# Altium footprint library Capacitor.PcbLib: 73 footprints (part 1 of 5)
Each footprint in its own frame and in the unit in brackets; x right, y up, seen from the top. Pads: shape width x height; smd on the part's side, far side on the other; paste and mask are expansions set on the pad; w line width, h text height; cw(c..) or ccw(c..) is an arc to the next point about the centre after c.
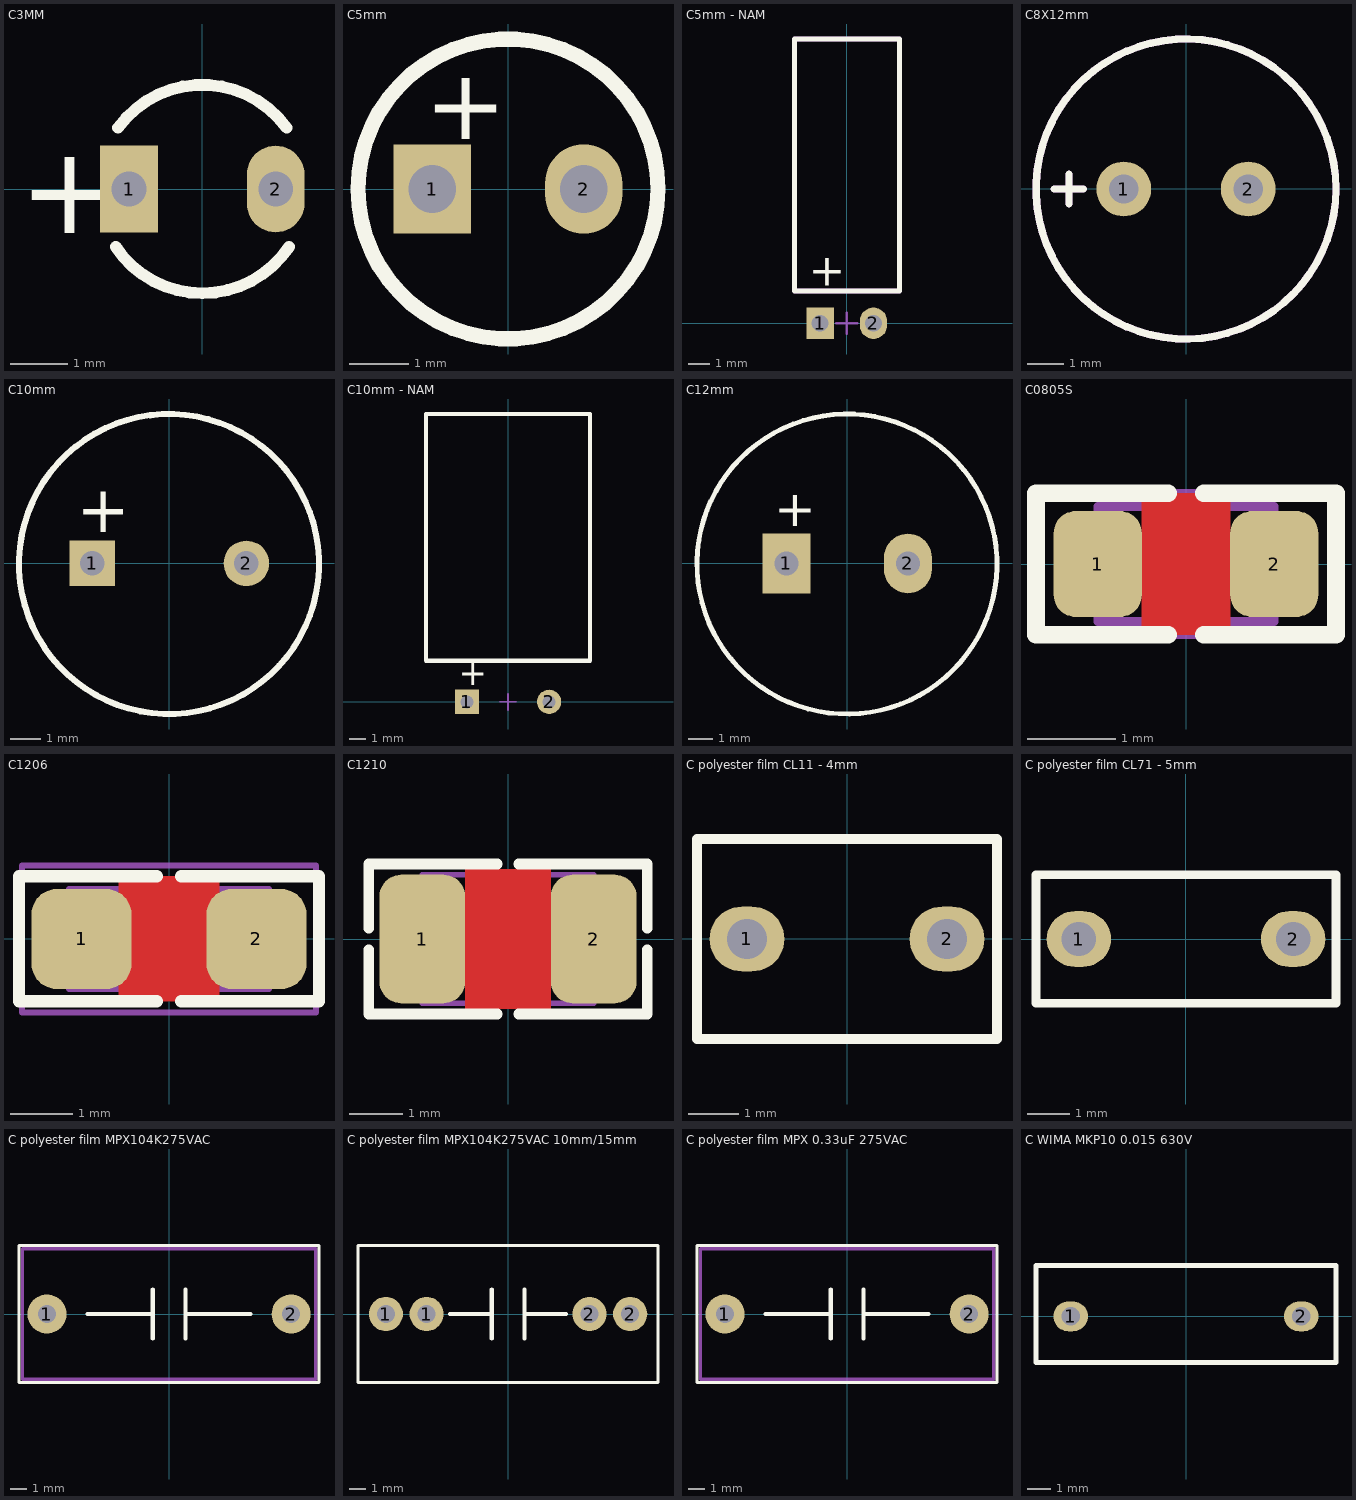
[diagram p0: the footprints below, top view; thin cyan lines are the x and y axes]

## C3MM [mm]
pads (2):
  rect 1x1.5 hole 0.6: 1(-1.27,0)
  oval 1x1.5 hole 0.6: 2(1.27,0)
Top Overlay:
  lines w0.203: -1.502,-1.001 ccw(c0,0) 1.502,-1.001 ; -1.46,1.062 cw(c0,0) 1.46,1.062
  text "+" at -3.175,-0.762 h1.52
Top Designator:
  text ".Designator" at -4.42,-0.369 h1.52
3D body "User Library-Capacitor Radial Electrolitic-150-400x700.step": height 7.01, standoff -2.7, extent -1.989,-2.025 2.01,1.975

## C5mm [mm]
pads (2):
  rect 1.3x1.5 hole 0.8: 1(-1.27,0)
  oval 1.3x1.5 hole 0.8: 2(1.27,0)
Top Overlay:
  circle w0.254: c0,0 r2.515
  text "+" at -1.397,0.838 h1.2
Top Designator:
  text ".Designator" at -3.71,-0.344 h1.52
3D body "User Library-Capacitor Radial Electrolitic 200 - 500x1100.step": height 11.01, standoff -2.7, extent -2.5,-2.5 2.51,2.5

## C5mm - NAM [mm]
pads (2):
  rect 1.3x1.5 hole 0.8: 1(-1.27,0)
  oval 1.3x1.5 hole 0.8: 2(1.27,0)
Top Overlay:
  lines w0.254: -2.489,1.537 2.511,1.537 2.511,13.537 -2.489,13.537 -2.489,1.537
  text "+" at -1.803,1.791 h1.52
Top Designator:
  text ".Designator" at -3.687,6.062 h1.52
Mechanical 12:
  lines w0.1: -0.5,0 0.5,0 ; 0,-0.5 0,0.5
Mechanical 15:
  lines w0.254: -2.489,1.537 2.511,1.537 2.511,13.537 -2.489,13.537 -2.489,1.537
  text "+" at -1.803,1.791 h1.52

## C8X12mm [mm] "Cap Elec, D8.0X12.0H pitch: 3.5mm, RB.14/.26, RB.15/.32"
height 12
pads (2):
  round 1.5 hole 0.8: 1(-1.7,0) 2(1.7,0)
Top Overlay:
  circle w0.2: c0,0 r4.1
  lines w0.2: -3.6,0 -2.8,0 ; -3.2,-0.4 -3.2,0.4
Top Designator:
  text ".Designator" at -3.71,-0.344 h1.52
Mechanical 15:
  circle w0.2: c0,0 r4.1
  lines w0.2: -3.6,0 -2.8,0 ; -3.2,-0.4 -3.2,0.4
3D body "User Library-Cap-EL(8x12-3_5)T.SLDPRT": height 12.3, standoff -3.3, extent -3.989,-3.989 4.001,3.989

## C10mm [mm]
pads (2):
  rect 1.5x1.5 hole 0.8: 1(-2.54,0)
  round 1.5 hole 0.8: 2(2.54,0)
Top Overlay:
  lines w0.203: 3.591,3.365 ccw(c-0.008,-0.022) 3.623,3.33
  text "+" at -3.048,1.016 h1.52
Top Designator:
  text ".Designator" at -3.718,-0.366 h1.52
3D body "User Library-Capacitor Radial Electrolitic 500-1000x2000.step": height 20.01, standoff -2.7, extent -4.988,-5 5.01,5

## C10mm - NAM [mm]
pads (2):
  rect 1.5x1.5 hole 0.8: 1(-2.54,0)
  round 1.5 hole 0.8: 2(2.54,0)
Top Overlay:
  lines w0.254: -5.067,2.54 -5.067,17.793 5.067,17.793 5.067,2.54 -5.067,2.54
  text "+" at -3.048,1.016 h1.52
Top Designator:
  text ".Designator" at -3.71,8.19 h1.52
Mechanical 12:
  lines w0.1: -0.5,0 0.5,0 ; 0,-0.5 0,0.5

## C12mm [mm]
pads (2):
  rect 2x2.5 hole 1: 1(-2.54,0)
  oval 2x2.5 hole 1: 2(2.54,0)
Top Overlay:
  lines w0.203: 4.556,4.273 ccw(c-0.008,-0.022) 4.597,4.228
  text "+" at -3.048,1.55 h1.52
Top Designator:
  text ".Designator" at -3.718,-0.366 h1.52
3D body "User Library-Capacitor Radial Electrolitic 500-1250x2500.step": height 2.2, standoff -25.51, extent -6.25,-6.25 6.26,6.25

## C0805S [mm]
pads (2):
  rrect50% 1x1.2 smd: 1(-1,0) 2(1,0)
Top Layer:
  pour cut-out: -0.5,0.8 0.5,0.8 0.5,-0.8 -0.5,-0.8
Top Overlay:
  lines w0.2: -0.2,-0.8 -1.7,-0.8 -1.7,0.8 -0.2,0.8 ; 0.2,-0.8 1.7,-0.8 1.7,0.8 0.2,0.8
Top Designator:
  text ".Designator" at -3.71,-0.344 h1.52
Mechanical 13:
  lines w0.1: -1,-0.65 1,-0.65 1,0.65 -1,0.65 -1,-0.65
Mechanical 15:
  lines w0.1: -1.7,-0.8 1.7,-0.8 1.7,0.8 -1.7,0.8 -1.7,-0.8
3D body "CAPC2012X10L.step": height 1, standoff 0, extent -1,-0.625 1,0.625

## C1206 [mm] "CHIP Capacitor, 3.2X1.6mm, 1206"
height 2
pads (2):
  rrect50% 1.6x1.6 smd: 1(-1.4,0) 2(1.4,0)
Top Layer:
  pour cut-out: -0.8,1 -0.8,-1 0.8,-1 0.8,1
Top Overlay:
  lines w0.2: -0.2,-1 -2.4,-1 -2.4,1 -0.2,1 ; 0.2,-1 2.4,-1 2.4,1 0.2,1
Top Designator:
  text ".Designator" at -3.71,-0.344 h1.52
Mechanical 13:
  lines w0.1: -1.6,-0.8 -1.6,0.8 1.6,0.8 1.6,-0.8 -1.6,-0.8
Mechanical 15:
  lines w0.1: -2.35,-1.175 -2.35,1.175 2.35,1.175 2.35,-1.175 -2.35,-1.175
3D body "User Library-CAPC3216X10.step": height 1, standoff 0, extent -1.6,-0.8 1.6,0.8

## C1210 [mm] "CHIP Capacitor, 3.2X2.5mm, 1210, 3225"
pads (2):
  rrect50% 1.6x2.4 smd paste-0.1 mask+0.075: 1(-1.6,0) 2(1.6,0)
Top Layer:
  pour cut-out: -0.8,1.3 -0.8,-1.3 0.8,-1.3 0.8,1.3
Top Overlay:
  lines w0.2: -2.6,-0.2 -2.6,-1.4 -0.2,-1.4 ; -2.6,0.2 -2.6,1.4 -0.2,1.4 ; 0.2,-1.4 2.6,-1.4 2.6,-0.2 ; 0.2,1.4 2.6,1.4 2.6,0.2
Top Designator:
  text ".Designator" at -3.71,-0.344 h1.52
Mechanical 13:
  lines w0.1: -1.6,-1.2 -1.6,1.2 1.6,1.2 1.6,-1.2 -1.6,-1.2
3D body "User Library-CAPC3225X10.step": height 1, standoff 0, extent -1.6,-1.25 1.6,1.25

## C polyester film CL11 - 4mm [mm] "tu keo xanh"
pads (2):
  oval 1.5x1.3 hole 0.8: 1(-2,0) 2(2,0)
Top Overlay:
  lines w0.203: -3,-2 -3,2 3,2 3,-2 -3,-2
Top Designator:
  text ".Designator" at -3.71,-0.344 h1.52
3D body "polyester capacitor.STEP": height 12.5, standoff -2, extent -3,-2 3,2

## C polyester film CL71 - 5mm [mm] "tu keo vang"
pads (2):
  oval 1.5x1.3 hole 0.8: 1(-2.5,0) 2(2.5,0)
Top Overlay:
  lines w0.203: -3.5,-1.5 -3.5,1.5 3.5,1.5 3.5,-1.5 -3.5,-1.5
Top Designator:
  text ".Designator" at -3.71,-0.344 h1.52
3D body "Part3.STEP": height 6.55, standoff -1.5, extent -3.55,-1.15 3.55,1.15

## C polyester film MPX104K275VAC [mm] "tu keo vang 0.1uF 275V"
pads (2):
  round 2.4 hole 1.1: 1(-7.5,0) 2(7.5,0)
Top Overlay:
  lines w0.203: -9.213,-4.205 9.208,-4.205 9.208,4.206 -9.213,4.206 -9.213,-4.205
  lines w0.254: -5,0 -1,0 ; -1,-1.5 -1,1.5 ; 1,-1.5 1,1.5 ; 1,0 5,0
Top 3D Body:
  lines w0.203: -9,-4 9,-4 9,4 -9,4 -9,-4
Top Designator:
  text ".Designator" at -3.713,-0.343 h1.52
3D body: height 12, standoff 0, extent -9,-4 9,4

## C polyester film MPX104K275VAC 10mm/15mm [mm] "tu keo vang 0.1uF 275V"
pads (4):
  round 2.1 hole 1.1: 1(-7.5,0) 1(-5,0) 2(5,0) 2(7.5,0)
Top Overlay:
  lines w0.203: -9.213,-4.205 9.208,-4.205 9.208,4.206 -9.213,4.206 -9.213,-4.205
  lines w0.254: -3.556,0 -1,0 ; -1,-1.5 -1,1.5 ; 1,-1.5 1,1.5 ; 1,0 3.556,0
Top Designator:
  text ".Designator" at -3.713,-0.343 h1.52
3D body: height 12, standoff 0, extent -9,-4 9,4

## C polyester film MPX 0.33uF 275VAC [mm] "tu keo vang 0.33uF 275V"
pads (2):
  round 2.4 hole 1.1: 1(-7.5,0) 2(7.5,0)
Top Overlay:
  lines w0.203: -9.213,-4.205 9.208,-4.205 9.208,4.206 -9.213,4.206 -9.213,-4.205
  lines w0.254: -5,0 -1,0 ; -1,-1.5 -1,1.5 ; 1,-1.5 1,1.5 ; 1,0 5,0
Top 3D Body:
  lines w0.203: -9,-4 9,-4 9,4 -9,4 -9,-4
Top Designator:
  text ".Designator" at -3.713,-0.343 h1.52
3D body "CX 15X18X11.STEP": height 11.02, standoff -3.48, extent -9,-2.5 9,2.5

## C WIMA MKP10 0.015 630V [mm] "WIMA MKP10 0.015 630V"
pads (2):
  oval 1.5x1.3 hole 0.8: 1(-5,0) 2(5,0)
Top Overlay:
  lines w0.203: -6.5,-2 6.5,-2 6.5,2.2 -6.5,2.2 -6.5,-2
Top Designator:
  text ".Designator" at -3.71,-0.344 h1.52
3D body "WIMAMKP4W4L13H9C10.SLDPRT": height 3, standoff -10, extent -6.5,-2 6.5,2.2